# Altium footprint library ProjectFootprints.PcbLib: 37 footprints (part 3 of 3)
Each footprint in its own frame and in the unit in brackets; x right, y up, seen from the top. Pads: shape width x height; smd on the part's side, far side on the other; paste and mask are expansions set on the pad; w line width, h text height; cw(c..) or ccw(c..) is an arc to the next point about the centre after c.
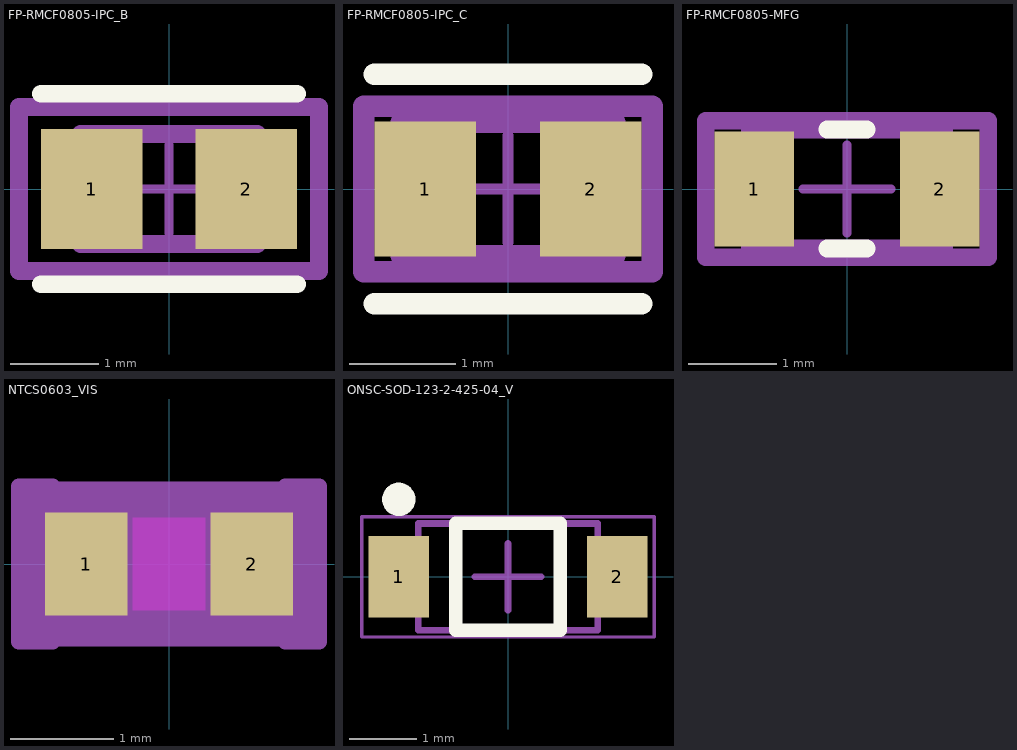
[diagram p2: the footprints below, top view; thin cyan lines are the x and y axes]

## FP-RMCF0805-IPC_B [mm]
pads (2):
  rect 1.155x1.362 smd paste+0 mask+0: 1(-0.876,0) 2(0.876,0)
Top Overlay:
  lines w0.2: -1.453,-1.081 1.453,-1.081 ; -1.453,1.081 1.453,1.081
Top Assembly:
  lines w0.2: -1.703,-0.931 -1.703,0.931 1.703,0.931 1.703,-0.931 -1.703,-0.931
  text ".Designator" at 0,0.188 h1
Top 3D Body:
  lines w0.2: -1,-0.625 -1,0.625 1,0.625 1,-0.625 -1,-0.625
Top Courtyard:
  lines w0.2: -1.703,-0.931 -1.703,0.931 1.703,0.931 1.703,-0.931 -1.703,-0.931
Top Component Center:
  lines w0.1: -0.5,0 0.5,0 ; 0,-0.5 0,0.5
3D body "Res_Stackpole_Electronics_RMCF0805JT220K_eec.STEP": height 0.25, standoff 0, extent -1.703,-0.931 1.703,0.931

## FP-RMCF0805-IPC_C [mm]
pads (2):
  rect 0.955x1.262 smd paste+0 mask+0: 1(-0.776,0) 2(0.776,0)
Top Overlay:
  lines w0.2: -1.253,-1.075 1.253,-1.075 ; -1.253,1.075 1.253,1.075
Top Assembly:
  lines w0.2: -1.353,-0.775 -1.353,0.775 1.353,0.775 1.353,-0.775 -1.353,-0.775
  text ".Designator" at 0,0.188 h1
Top 3D Body:
  lines w0.2: -1,-0.625 -1,0.625 1,0.625 1,-0.625 -1,-0.625
Top Courtyard:
  lines w0.2: -1.353,-0.775 -1.353,0.775 1.353,0.775 1.353,-0.775 -1.353,-0.775
Top Component Center:
  lines w0.1: -0.5,0 0.5,0 ; 0,-0.5 0,0.5
3D body "Res_Stackpole_Electronics_RMCF0805JT220K_eec.STEP": height 0.25, standoff 0, extent -1.353,-0.775 1.353,0.775

## FP-RMCF0805-MFG [mm]
pads (2):
  rect 0.9x1.3 smd paste+0 mask+0: 1(-1.05,0) 2(1.05,0)
Top Overlay:
  lines w0.2: -0.225,-0.675 0.225,-0.675 ; -0.225,0.675 0.225,0.675
Top Assembly:
  lines w0.2: -1.6,-0.775 1.6,-0.775 1.6,0.775 -1.6,0.775 -1.6,-0.775
  text ".Designator" at 0,0.188 h1
Top 3D Body:
  lines w0.2: -1.1,-0.675 1.1,-0.675 1.1,0.675 -1.1,0.675 -1.1,-0.675
Top Courtyard:
  lines w0.2: -1.6,-0.775 1.6,-0.775 1.6,0.775 -1.6,0.775 -1.6,-0.775
Top Component Center:
  lines w0.1: -0.5,0 0.5,0 ; 0,-0.5 0,0.5
3D body "Res_Stackpole_Electronics_RMCF0805JT220K_eec.STEP": height 0.25, standoff 0, extent -1.6,-0.775 1.6,0.775

## NTCS0603_VIS [mm]
pads (2):
  rect 0.8x1 smd paste+0 mask+0: 1(-0.8,0) 2(0.8,0)
Top Layer keep-out:
  region: -0.349,-0.449 -0.349,0.449 0.349,0.449 0.349,-0.449
Top 3D Body:
  lines w0.025: -0.876,-0.47 0.876,-0.47 0.876,0.47 -0.876,0.47 -0.876,-0.47
Top Courtyard:
  region: -1.13,-0.754 -1.454,-0.754 -1.454,0.754 -1.13,0.754 -1.13,0.724 1.13,0.724 1.13,0.754 1.454,0.754 1.454,-0.754 1.13,-0.754 1.13,-0.724 -1.13,-0.724
  lines w0.152: -1.454,-0.754 -1.454,0.754 -1.13,0.754 -1.13,0.724 1.13,0.724 1.13,0.754 1.454,0.754 1.454,-0.754 1.13,-0.754 1.13,-0.724 -1.13,-0.724 -1.13,-0.754 -1.454,-0.754
3D body "NTCS0603_VIS.step": height 0.94, standoff 0, extent -0.876,-0.47 0.876,0.47

## ONSC-SOD-123-2-425-04_V [mm] "SOD, 2-Leads, Body 2.69x1.6mm"
height 1.35
pads (2):
  rect 0.91x1.22 smd: 1(-1.635,0) 2(1.635,0)
Top Overlay:
  circle w0.25: c-1.635,1.16 r0.125
  lines w0.2: -0.78,-0.8 -0.78,0.8 0.78,0.8 0.78,-0.8 -0.78,-0.8
Top 3D Body:
  lines w0.1: -1.345,-0.8 -1.345,0.8 1.345,0.8 1.345,-0.8 -1.345,-0.8
Top Courtyard:
  lines w0.05: -2.19,-0.9 -2.19,0.9 2.19,0.9 2.19,-0.9 -2.19,-0.9
  lines w0.1: -0.5,0 0.5,0 ; 0,-0.5 0,0.5
3D body: height 1.35, standoff 0, extent -1.345,-0.8 1.345,0.8